# Altium integrated library SSW-103-02-G-S-RA.IntLib: 1 symbol
Pins are listed as number, name and electrical type; pins without a type are passive.

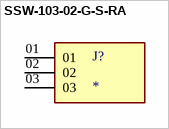
[diagram p0: symbol SSW-103-02-G-S-RA]

## SSW-103-02-G-S-RA
designator J?
MF: Samtec Inc.; MP: SSW-103-02-G-S-RA; Availability: Unavailable; Price: None; Package: None; Value: *
footprint SAMTEC_SSW-103-02-G-S-RA
pins: 01, 02, 03